# Altium footprint library Terminal_Blocks_Pluggable PCB_5.08mm.PcbLib: 299 footprints (part 15 of 19)
Each footprint in its own frame and in the unit in brackets; x right, y up, seen from the top. Pads: shape width x height; smd on the part's side, far side on the other; paste and mask are expansions set on the pad; w line width, h text height; cw(c..) or ccw(c..) is an arc to the next point about the centre after c.
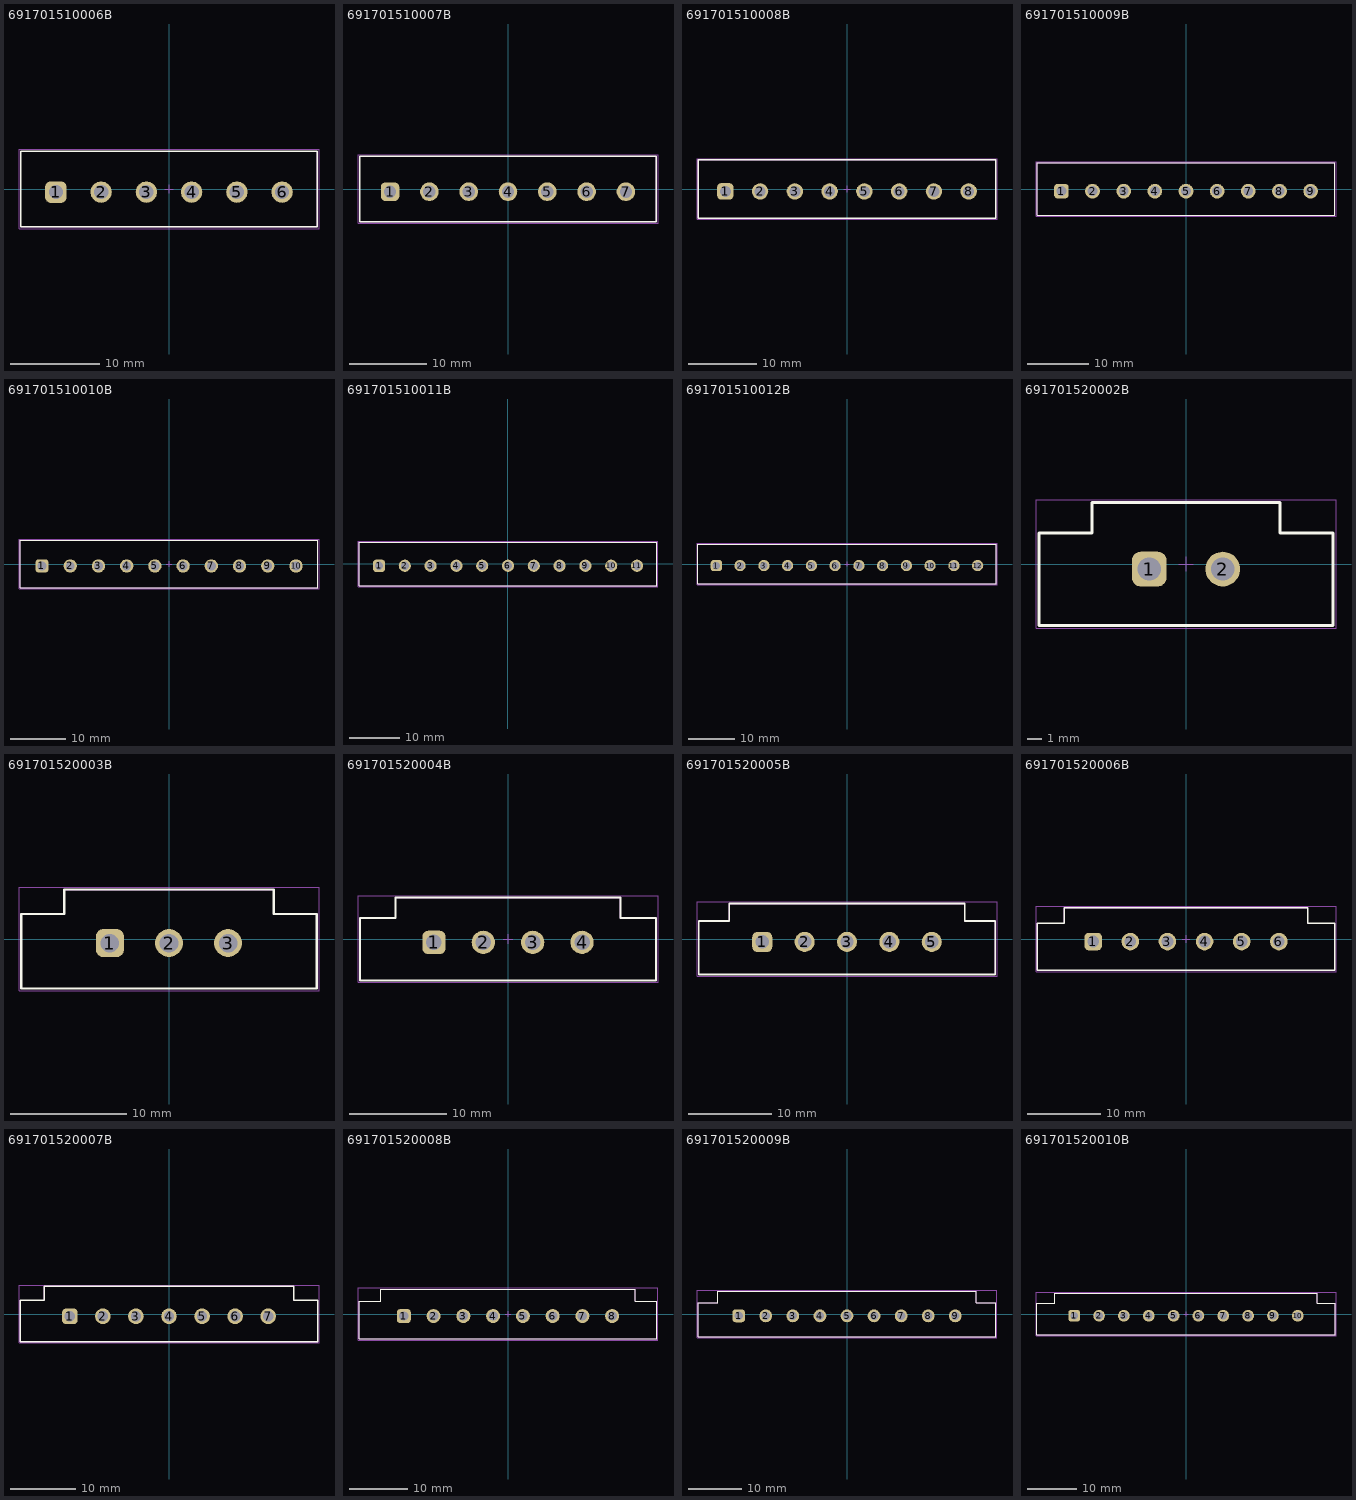
[diagram p14: the footprints below, top view; thin cyan lines are the x and y axes]

## 691701510006B [mm] "THR - 5,08mm - PCB Vertical Close - 06p"
height 12
pads (6):
  rrect50% 2.4x2.4 hole 1.6: 1(-12.7,-0.35)
  round 2.4 hole 1.6: 2(-7.62,-0.35) 3(-2.54,-0.35) 4(2.54,-0.35) 5(7.62,-0.35) 6(12.7,-0.35)
Top Overlay:
  lines w0.2: -16.64,-4.25 -16.64,4.25 16.64,4.25 16.64,-4.25 -16.64,-4.25
Top Designator:
  text ".Designator" at -7.498,-0.5 h1.5
Top Component Outline:
  lines w0.1: -16.64,-4.25 16.64,-4.25 16.64,4.25 -16.64,4.25 -16.64,-4.25
Top 3D Body:
  lines w0.1: -16.64,-4.25 -16.64,4.25 16.64,4.25 16.64,-4.25 -16.64,-4.25
Top Courtyard:
  lines w0.05: -16.84,-4.45 -16.84,4.45 16.84,4.45 16.84,-4.45 -16.84,-4.45
Top Component Center:
  lines w0.05: -0.5,0 0.5,0 ; 0,-0.5 0,0.5
3D body "691701510006B.stp": height 12.1, standoff -2.5, extent -16.64,-4.25 16.64,4.25

## 691701510007B [mm] "THR - 5,08mm - PCB Vertical Close - 07p"
height 12
pads (7):
  rrect50% 2.4x2.4 hole 1.6: 1(-15.24,-0.35)
  round 2.4 hole 1.6: 2(-10.16,-0.35) 3(-5.08,-0.35) 4(0,-0.35) 5(5.08,-0.35) 6(10.16,-0.35) 7(15.24,-0.35)
Top Overlay:
  lines w0.2: -19.18,-4.25 19.18,-4.25 19.18,4.25 -19.18,4.25 -19.18,-4.25
Top Designator:
  text ".Designator" at -7.498,-0.5 h1.5
Top Component Outline:
  lines w0.1: -19.18,-4.25 -19.18,4.25 19.18,4.25 19.18,-4.25 -19.18,-4.25
Top 3D Body:
  lines w0.1: -19.18,-4.25 19.18,-4.25 19.18,4.25 -19.18,4.25 -19.18,-4.25
Top Courtyard:
  lines w0.05: -19.38,-4.45 19.38,-4.45 19.38,4.45 -19.38,4.45 -19.38,-4.45
Top Component Center:
  lines w0.05: -0.5,0 0.5,0 ; 0,-0.5 0,0.5
3D body "691701510007B.stp": height 12.1, standoff -2.5, extent -19.18,-4.25 19.18,4.25

## 691701510008B [mm] "THR - 5,08mm - PCB Vertical Close - 08p"
height 12
pads (8):
  rrect50% 2.4x2.4 hole 1.6: 1(-17.78,-0.35)
  round 2.4 hole 1.6: 2(-12.7,-0.35) 3(-7.62,-0.35) 4(-2.54,-0.35) 5(2.54,-0.35) 6(7.62,-0.35) 7(12.7,-0.35) 8(17.78,-0.35)
Top Overlay:
  lines w0.2: -21.72,-4.25 -21.72,4.25 21.72,4.25 21.72,-4.25 -21.72,-4.25
Top Designator:
  text ".Designator" at -7.498,-0.5 h1.5
Top Component Outline:
  lines w0.1: -21.72,-4.25 21.72,-4.25 21.72,4.25 -21.72,4.25 -21.72,-4.25
Top 3D Body:
  lines w0.1: -21.72,-4.25 -21.72,4.25 21.72,4.25 21.72,-4.25 -21.72,-4.25
Top Courtyard:
  lines w0.05: -21.92,-4.45 -21.92,4.45 21.92,4.45 21.92,-4.45 -21.92,-4.45
Top Component Center:
  lines w0.05: -0.5,0 0.5,0 ; 0,-0.5 0,0.5
3D body "691701510008B.stp": height 12.1, standoff -2.5, extent -21.72,-4.25 21.72,4.25

## 691701510009B [mm] "THR - 5,08mm - PCB Vertical Close - 09p"
height 12
pads (9):
  rrect50% 2.4x2.4 hole 1.6: 1(-20.32,-0.35)
  round 2.4 hole 1.6: 2(-15.24,-0.35) 3(-10.16,-0.35) 4(-5.08,-0.35) 5(0,-0.35) 6(5.08,-0.35) 7(10.16,-0.35) 8(15.24,-0.35) 9(20.32,-0.35)
Top Overlay:
  lines w0.2: -24.26,-4.25 24.26,-4.25 24.26,4.25 -24.26,4.25 -24.26,-4.25
Top Designator:
  text ".Designator" at -7.498,-0.5 h1.5
Top Component Outline:
  lines w0.1: -24.26,-4.25 -24.26,4.25 24.26,4.25 24.26,-4.25 -24.26,-4.25
Top 3D Body:
  lines w0.1: -24.26,-4.25 24.26,-4.25 24.26,4.25 -24.26,4.25 -24.26,-4.25
Top Courtyard:
  lines w0.05: -24.46,-4.45 24.46,-4.45 24.46,4.45 -24.46,4.45 -24.46,-4.45
Top Component Center:
  lines w0.05: -0.5,0 0.5,0 ; 0,-0.5 0,0.5
3D body "691701510009B.stp": height 12.1, standoff -2.5, extent -24.26,-4.25 24.26,4.25

## 691701510010B [mm] "THR - 5,08mm - PCB Vertical Close - 10p"
height 12
pads (10):
  rrect50% 2.4x2.4 hole 1.6: 1(-22.86,-0.35)
  round 2.4 hole 1.6: 2(-17.78,-0.35) 3(-12.7,-0.35) 4(-7.62,-0.35) 5(-2.54,-0.35) 6(2.54,-0.35) 7(7.62,-0.35) 8(12.7,-0.35) 9(17.78,-0.35) 10(22.86,-0.35)
Top Overlay:
  lines w0.2: -26.8,-4.25 26.8,-4.25 26.8,4.25 -26.8,4.25 -26.8,-4.25
Top Designator:
  text ".Designator" at -7.498,-0.5 h1.5
Top Component Outline:
  lines w0.1: -26.8,-4.25 -26.8,4.25 26.8,4.25 26.8,-4.25 -26.8,-4.25
Top 3D Body:
  lines w0.1: -26.8,-4.25 26.8,-4.25 26.8,4.25 -26.8,4.25 -26.8,-4.25
Top Courtyard:
  lines w0.05: -27,-4.45 27,-4.45 27,4.45 -27,4.45 -27,-4.45
Top Component Center:
  lines w0.05: -0.5,0 0.5,0 ; 0,-0.5 0,0.5
3D body "691701510010B.stp": height 12.1, standoff -2.5, extent -26.8,-4.25 26.8,4.25

## 691701510011B [mm] "THR - 5,08mm - PCB Vertical Close - 11p"
height 12
pads (11):
  rrect50% 2.4x2.4 hole 1.6: 1(-25.4,-0.35)
  round 2.4 hole 1.6: 2(-20.32,-0.35) 3(-15.24,-0.35) 4(-10.16,-0.35) 5(-5.08,-0.35) 6(0,-0.35) 7(5.08,-0.35) 8(10.16,-0.35) 9(15.24,-0.35) 10(20.32,-0.35) 11(25.4,-0.35)
Top Overlay:
  lines w0.2: -29.34,-4.25 -29.34,4.25 29.34,4.25 29.34,-4.25 -29.34,-4.25
Top Designator:
  text ".Designator" at -7.498,-0.5 h1.5
Top Component Outline:
  lines w0.1: -29.34,-4.25 29.34,-4.25 29.34,4.25 -29.34,4.25 -29.34,-4.25
Top 3D Body:
  lines w0.1: -29.34,-4.25 -29.34,4.25 29.34,4.25 29.34,-4.25 -29.34,-4.25
Top Courtyard:
  lines w0.05: -29.54,-4.45 -29.54,4.45 29.54,4.45 29.54,-4.45 -29.54,-4.45
Top Component Center:
  lines w0.05: -0.5,0 0.5,0 ; 0,-0.5 0,0.5
3D body "691701510011B.stp": height 12.1, standoff -2.5, extent -29.34,-4.25 29.34,4.25

## 691701510012B [mm] "THR - 5,08mm - PCB Vertical Close - 12p"
height 12
pads (12):
  rrect50% 2.4x2.4 hole 1.6: 1(-27.94,-0.35)
  round 2.4 hole 1.6: 2(-22.86,-0.35) 3(-17.78,-0.35) 4(-12.7,-0.35) 5(-7.62,-0.35) 6(-2.54,-0.35) 7(2.54,-0.35) 8(7.62,-0.35) 9(12.7,-0.35) 10(17.78,-0.35) 11(22.86,-0.35) 12(27.94,-0.35)
Top Overlay:
  lines w0.2: -31.88,-4.25 -31.88,4.25 31.88,4.25 31.88,-4.25 -31.88,-4.25
Top Designator:
  text ".Designator" at -7.498,-0.5 h1.5
Top Component Outline:
  lines w0.1: -31.88,-4.25 31.88,-4.25 31.88,4.25 -31.88,4.25 -31.88,-4.25
Top 3D Body:
  lines w0.1: -31.88,-4.25 -31.88,4.25 31.88,4.25 31.88,-4.25 -31.88,-4.25
Top Courtyard:
  lines w0.05: -32.08,-4.45 -32.08,4.45 32.08,4.45 32.08,-4.45 -32.08,-4.45
Top Component Center:
  lines w0.05: -0.5,0 0.5,0 ; 0,-0.5 0,0.5
3D body "691701510012B.stp": height 12.1, standoff -2.5, extent -31.88,-4.25 31.88,4.25

## 691701520002B [mm] "THR - 5,08mm - PCB Vertical Flange - 02p"
height 12
pads (2):
  rrect50% 2.4x2.4 hole 1.6: 1(-2.54,-0.35)
  round 2.4 hole 1.6: 2(2.54,-0.35)
Top Overlay:
  lines w0.2: -10.16,-4.25 10.16,-4.25 10.16,2.15 6.48,2.15 6.48,4.25 -6.48,4.25 -6.48,2.15 -10.16,2.15 -10.16,-4.25
Top Designator:
  text ".Designator" at -7.498,-0.5 h1.5
Top Component Outline:
  lines w0.1: -10.16,-4.25 -10.16,2.15 -6.48,2.15 -6.48,4.25 6.48,4.25 6.48,2.15 10.16,2.15 10.16,-4.25 -10.16,-4.25
Top 3D Body:
  lines w0.1: -10.16,-4.25 10.16,-4.25 10.16,2.15 6.48,2.15 6.48,4.25 -6.48,4.25 -6.48,2.15 -10.16,2.15 -10.16,-4.25
Top Courtyard:
  lines w0.05: -10.36,-4.45 10.36,-4.45 10.36,4.45 -10.36,4.45 -10.36,-4.45
Top Component Center:
  lines w0.05: -0.5,0 0.5,0 ; 0,-0.5 0,0.5
3D body "691701520002B.stp": height 12.1, standoff -2.5, extent -10.16,-4.25 10.16,4.25

## 691701520003B [mm] "THR - 5,08mm - PCB Vertical Flange - 03p"
height 12
pads (3):
  rrect50% 2.4x2.4 hole 1.6: 1(-5.08,-0.35)
  round 2.4 hole 1.6: 2(0,-0.35) 3(5.08,-0.35)
Top Overlay:
  lines w0.2: -12.7,-4.25 12.7,-4.25 12.7,2.15 9.02,2.15 9.02,4.25 -9.02,4.25 -9.02,2.15 -12.7,2.15 -12.7,-4.25
Top Designator:
  text ".Designator" at -7.498,-0.5 h1.5
Top Component Outline:
  lines w0.1: -12.7,-4.25 -12.7,2.15 -9.02,2.15 -9.02,4.25 9.02,4.25 9.02,2.15 12.7,2.15 12.7,-4.25 -12.7,-4.25
Top 3D Body:
  lines w0.1: -12.7,-4.25 12.7,-4.25 12.7,2.15 9.02,2.15 9.02,4.25 -9.02,4.25 -9.02,2.15 -12.7,2.15 -12.7,-4.25
Top Courtyard:
  lines w0.05: -12.9,-4.45 12.9,-4.45 12.9,4.45 -12.9,4.45 -12.9,-4.45
Top Component Center:
  lines w0.05: -0.5,0 0.5,0 ; 0,-0.5 0,0.5
3D body "691701520003B.stp": height 12.1, standoff -2.5, extent -12.7,-4.25 12.7,4.25

## 691701520004B [mm] "THR - 5,08mm - PCB Vertical Flange - 04p"
height 12
pads (4):
  rrect50% 2.4x2.4 hole 1.6: 1(-7.62,-0.35)
  round 2.4 hole 1.6: 2(-2.54,-0.35) 3(2.54,-0.35) 4(7.62,-0.35)
Top Overlay:
  lines w0.2: -15.24,-4.25 -15.24,2.15 -11.56,2.15 -11.56,4.25 11.56,4.25 11.56,2.15 15.24,2.15 15.24,-4.25 -15.24,-4.25
Top Designator:
  text ".Designator" at -7.498,-0.5 h1.5
Top Component Outline:
  lines w0.1: -15.24,-4.25 15.24,-4.25 15.24,2.15 11.56,2.15 11.56,4.25 -11.56,4.25 -11.56,2.15 -15.24,2.15 -15.24,-4.25
Top 3D Body:
  lines w0.1: -15.24,-4.25 -15.24,2.15 -11.56,2.15 -11.56,4.25 11.56,4.25 11.56,2.15 15.24,2.15 15.24,-4.25 -15.24,-4.25
Top Courtyard:
  lines w0.05: -15.44,-4.45 -15.44,4.45 15.44,4.45 15.44,-4.45 -15.44,-4.45
Top Component Center:
  lines w0.05: -0.5,0 0.5,0 ; 0,-0.5 0,0.5
3D body "691701520004B.stp": height 12.1, standoff -2.5, extent -15.24,-4.25 15.24,4.25

## 691701520005B [mm] "THR - 5,08mm - PCB Vertical Flange - 05p"
height 12
pads (5):
  rrect50% 2.4x2.4 hole 1.6: 1(-10.16,-0.35)
  round 2.4 hole 1.6: 2(-5.08,-0.35) 3(0,-0.35) 4(5.08,-0.35) 5(10.16,-0.35)
Top Overlay:
  lines w0.2: -17.78,-4.25 -17.78,2.15 -14.1,2.15 -14.1,4.25 14.1,4.25 14.1,2.15 17.78,2.15 17.78,-4.25 -17.78,-4.25
Top Designator:
  text ".Designator" at -7.498,-0.5 h1.5
Top Component Outline:
  lines w0.1: -17.78,-4.25 17.78,-4.25 17.78,2.15 14.1,2.15 14.1,4.25 -14.1,4.25 -14.1,2.15 -17.78,2.15 -17.78,-4.25
Top 3D Body:
  lines w0.1: -17.78,-4.25 -17.78,2.15 -14.1,2.15 -14.1,4.25 14.1,4.25 14.1,2.15 17.78,2.15 17.78,-4.25 -17.78,-4.25
Top Courtyard:
  lines w0.05: -17.98,-4.45 -17.98,4.45 17.98,4.45 17.98,-4.45 -17.98,-4.45
Top Component Center:
  lines w0.05: -0.5,0 0.5,0 ; 0,-0.5 0,0.5
3D body "691701520005B.stp": height 12.1, standoff -2.5, extent -17.78,-4.25 17.78,4.25

## 691701520006B [mm] "THR - 5,08mm - PCB Vertical Flange - 06p"
height 12
pads (6):
  rrect50% 2.4x2.4 hole 1.6: 1(-12.7,-0.35)
  round 2.4 hole 1.6: 2(-7.62,-0.35) 3(-2.54,-0.35) 4(2.54,-0.35) 5(7.62,-0.35) 6(12.7,-0.35)
Top Overlay:
  lines w0.2: -20.32,-4.25 20.32,-4.25 20.32,2.15 16.64,2.15 16.64,4.25 -16.64,4.25 -16.64,2.15 -20.32,2.15 -20.32,-4.25
Top Designator:
  text ".Designator" at -7.498,-0.5 h1.5
Top Component Outline:
  lines w0.1: -20.32,-4.25 -20.32,2.15 -16.64,2.15 -16.64,4.25 16.64,4.25 16.64,2.15 20.32,2.15 20.32,-4.25 -20.32,-4.25
Top 3D Body:
  lines w0.1: -20.32,-4.25 20.32,-4.25 20.32,2.15 16.64,2.15 16.64,4.25 -16.64,4.25 -16.64,2.15 -20.32,2.15 -20.32,-4.25
Top Courtyard:
  lines w0.05: -20.52,-4.45 20.52,-4.45 20.52,4.45 -20.52,4.45 -20.52,-4.45
Top Component Center:
  lines w0.05: -0.5,0 0.5,0 ; 0,-0.5 0,0.5
3D body "691701520006B.stp": height 12.1, standoff -2.5, extent -20.32,-4.25 20.32,4.25

## 691701520007B [mm] "THR - 5,08mm - PCB Vertical Flange - 07p"
height 12
pads (7):
  rrect50% 2.4x2.4 hole 1.6: 1(-15.24,-0.35)
  round 2.4 hole 1.6: 2(-10.16,-0.35) 3(-5.08,-0.35) 4(0,-0.35) 5(5.08,-0.35) 6(10.16,-0.35) 7(15.24,-0.35)
Top Overlay:
  lines w0.2: -22.86,-4.25 22.86,-4.25 22.86,2.15 19.18,2.15 19.18,4.25 -19.18,4.25 -19.18,2.15 -22.86,2.15 -22.86,-4.25
Top Designator:
  text ".Designator" at -7.498,-0.5 h1.5
Top Component Outline:
  lines w0.1: -22.86,-4.25 -22.86,2.15 -19.18,2.15 -19.18,4.25 19.18,4.25 19.18,2.15 22.86,2.15 22.86,-4.25 -22.86,-4.25
Top 3D Body:
  lines w0.1: -22.86,-4.25 22.86,-4.25 22.86,2.15 19.18,2.15 19.18,4.25 -19.18,4.25 -19.18,2.15 -22.86,2.15 -22.86,-4.25
Top Courtyard:
  lines w0.05: -23.06,-4.45 23.06,-4.45 23.06,4.45 -23.06,4.45 -23.06,-4.45
Top Component Center:
  lines w0.05: -0.5,0 0.5,0 ; 0,-0.5 0,0.5
3D body "691701520007B.stp": height 12.1, standoff -2.5, extent -22.86,-4.25 22.86,4.25

## 691701520008B [mm] "THR - 5,08mm - PCB Vertical Flange - 08p"
height 12
pads (8):
  rrect50% 2.4x2.4 hole 1.6: 1(-17.78,-0.35)
  round 2.4 hole 1.6: 2(-12.7,-0.35) 3(-7.62,-0.35) 4(-2.54,-0.35) 5(2.54,-0.35) 6(7.62,-0.35) 7(12.7,-0.35) 8(17.78,-0.35)
Top Overlay:
  lines w0.2: -25.4,-4.25 25.4,-4.25 25.4,2.15 21.72,2.15 21.72,4.25 -21.72,4.25 -21.72,2.15 -25.4,2.15 -25.4,-4.25
Top Designator:
  text ".Designator" at -7.498,-0.5 h1.5
Top Component Outline:
  lines w0.1: -25.4,-4.25 -25.4,2.15 -21.72,2.15 -21.72,4.25 21.72,4.25 21.72,2.15 25.4,2.15 25.4,-4.25 -25.4,-4.25
Top 3D Body:
  lines w0.1: -25.4,-4.25 25.4,-4.25 25.4,2.15 21.72,2.15 21.72,4.25 -21.72,4.25 -21.72,2.15 -25.4,2.15 -25.4,-4.25
Top Courtyard:
  lines w0.05: -25.6,-4.45 25.6,-4.45 25.6,4.45 -25.6,4.45 -25.6,-4.45
Top Component Center:
  lines w0.05: -0.5,0 0.5,0 ; 0,-0.5 0,0.5
3D body "691701520008B.stp": height 12.1, standoff -2.5, extent -25.4,-4.25 25.4,4.25

## 691701520009B [mm] "THR - 5,08mm - PCB Vertical Flange - 09p"
height 12
pads (9):
  rrect50% 2.4x2.4 hole 1.6: 1(-20.32,-0.35)
  round 2.4 hole 1.6: 2(-15.24,-0.35) 3(-10.16,-0.35) 4(-5.08,-0.35) 5(0,-0.35) 6(5.08,-0.35) 7(10.16,-0.35) 8(15.24,-0.35) 9(20.32,-0.35)
Top Overlay:
  lines w0.2: -27.94,-4.25 -27.94,2.15 -24.26,2.15 -24.26,4.25 24.26,4.25 24.26,2.15 27.94,2.15 27.94,-4.25 -27.94,-4.25
Top Designator:
  text ".Designator" at -7.498,-0.5 h1.5
Top Component Outline:
  lines w0.1: -27.94,-4.25 27.94,-4.25 27.94,2.15 24.26,2.15 24.26,4.25 -24.26,4.25 -24.26,2.15 -27.94,2.15 -27.94,-4.25
Top 3D Body:
  lines w0.1: -27.94,-4.25 -27.94,2.15 -24.26,2.15 -24.26,4.25 24.26,4.25 24.26,2.15 27.94,2.15 27.94,-4.25 -27.94,-4.25
Top Courtyard:
  lines w0.05: -28.14,-4.45 -28.14,4.45 28.14,4.45 28.14,-4.45 -28.14,-4.45
Top Component Center:
  lines w0.05: -0.5,0 0.5,0 ; 0,-0.5 0,0.5
3D body "691701520009B.stp": height 12.1, standoff -2.5, extent -27.94,-4.25 27.94,4.25

## 691701520010B [mm] "THR - 5,08mm - PCB Vertical Flange - 10p"
height 12
pads (10):
  rrect50% 2.4x2.4 hole 1.6: 1(-22.86,-0.35)
  round 2.4 hole 1.6: 2(-17.78,-0.35) 3(-12.7,-0.35) 4(-7.62,-0.35) 5(-2.54,-0.35) 6(2.54,-0.35) 7(7.62,-0.35) 8(12.7,-0.35) 9(17.78,-0.35) 10(22.86,-0.35)
Top Overlay:
  lines w0.2: -30.48,-4.25 -30.48,2.15 -26.8,2.15 -26.8,4.25 26.8,4.25 26.8,2.15 30.48,2.15 30.48,-4.25 -30.48,-4.25
Top Designator:
  text ".Designator" at -7.498,-0.5 h1.5
Top Component Outline:
  lines w0.1: -30.48,-4.25 30.48,-4.25 30.48,2.15 26.8,2.15 26.8,4.25 -26.8,4.25 -26.8,2.15 -30.48,2.15 -30.48,-4.25
Top 3D Body:
  lines w0.1: -30.48,-4.25 -30.48,2.15 -26.8,2.15 -26.8,4.25 26.8,4.25 26.8,2.15 30.48,2.15 30.48,-4.25 -30.48,-4.25
Top Courtyard:
  lines w0.05: -30.68,-4.45 -30.68,4.45 30.68,4.45 30.68,-4.45 -30.68,-4.45
Top Component Center:
  lines w0.05: -0.5,0 0.5,0 ; 0,-0.5 0,0.5
3D body "691701520010B.stp": height 12.1, standoff -2.5, extent -30.48,-4.25 30.48,4.25